# Altium integrated library ATK-MD0350_V3.0.IntLib: 21 symbols
Pins are listed as number, name and electrical type; pins without a type are passive.

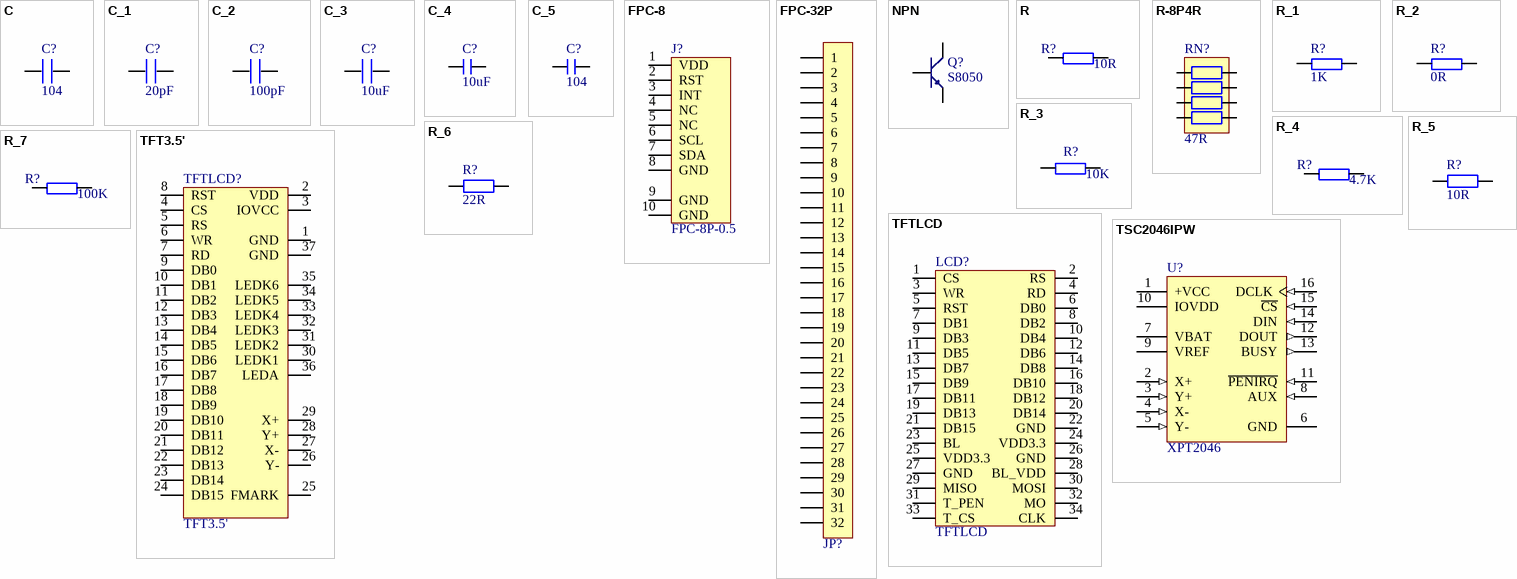
[diagram p0: symbols C to TSC2046IPW]

## C
designator C?, comment 104
footprint 0603P
footprint 0805
footprint C 0402 (无极性贴片电容(0402))
pins: 1, 2

## C_1
designator C?, comment 20pF
footprint 0603P
footprint 0805
footprint CC5.08 (CAP0.1)
footprint CC4.572 (222/332)
footprint 1206
footprint 1210
footprint CC6.096
footprint CC7.62
footprint C 0805 (无极性贴片电容(0805))
footprint C 0603 (无极性贴片电容(0603))
footprint C 0402 (无极性贴片电容(0402))
pins: 1, 2

## C_2
designator C?, comment 100pF
footprint 0603P
footprint 0805
footprint CC5.08 (CAP0.1)
footprint CC4.572 (222/332)
footprint 1206
footprint 1210
footprint CC6.096
footprint CC7.62
footprint C 0805 (无极性贴片电容(0805))
footprint C 0603 (无极性贴片电容(0603))
footprint C 0402 (无极性贴片电容(0402))
pins: 1, 2

## C_3
designator C?, comment 10uF
footprint 0603P
footprint 0805
footprint CC5.08 (CAP0.1)
footprint CC4.572 (222/332)
footprint 1206
footprint 1210
footprint CC6.096
footprint CC7.62
footprint C 0603 (无极性贴片电容(0603))
pins: 1, 2

## C_4
designator C?, comment 10uF
无极性电容; BOM名称: 无极性贴片电容; 版权归属: 正点原子; 学习资源: www.openedv.com
footprint C 0201 (无极性贴片电容)
footprint C 0402 (无极性贴片电容)
footprint C 0603 (无极性贴片电容)
footprint C 0805 (无极性贴片电容)
footprint C 1206 (无极性贴片电容)
footprint C 1210 (无极性贴片电容)
footprint C 1808 (无极性贴片电容)
footprint C 1812 (无极性贴片电容)
footprint C 1825 (无极性贴片电容)
footprint C 2225 (无极性贴片电容)
pins: 1, 2

## C_5
designator C?, comment 104
无极性电容; BOM名称: 无极性贴片电容; 版权归属: 正点原子; 学习资源: www.openedv.com
footprint C 0201 (无极性贴片电容)
footprint C 0402 (无极性贴片电容)
footprint C 0603 (无极性贴片电容)
footprint C 0805 (无极性贴片电容)
footprint C 1206 (无极性贴片电容)
footprint C 1210 (无极性贴片电容)
footprint C 1808 (无极性贴片电容)
footprint C 1812 (无极性贴片电容)
footprint C 1825 (无极性贴片电容)
footprint C 2225 (无极性贴片电容)
pins: 1, 2

## FPC-8
designator J?, comment FPC-8P-0.5
FPC-8P-0.5mm
footprint FPC50
footprint FPC-8P (FPC;8P;0.5mm;)
pins: 1 VDD, 2 RST, 3 INT, 4 NC, 5 NC, 6 SCL, 7 SDA, 8 GND, 9 GND, 10 GND
2 alternate drawings of the same symbol

## FPC-32P
designator JP?, comment FPC1.0-32P  (value not drawn)
FPC连接器; 版权归属: 源创客; BOM名称: FPC连接器; 学习资源: www.ooocke.com
footprint FPC1.25A-LI-32P (32脚，长：43.5mm，宽：4.5mm，高：7.3mm)
footprint FPC0.5 2H-WS-32P (长：20.2mm，宽：5.2mm，高：2mm)
footprint FPC 0.5 32P H-S (FPC座 0.5mm 32P 卧式贴片)
pins: 1, 2, 3, 4, 5, 6, 7, 8, 9, 10, 11, 12, 13, 14, 15, 16, 17, 18, 19, 20, 21, 22, 23, 24, 25, 26, 27, 28, 29, 30, 31, 32

## NPN
designator Q?, comment S8050
8050/BCW846/BCW847
footprint SOT-23R (SOT-23; 3 Leads; Body 3.0 x 2.5 mm, inc. leads (LxW max))
footprint NPN
pins: 1 E, 2 B, 3 C

## R
designator R?, comment 10R
footprint 0805
footprint 0603P
footprint RL (10o/0.7uH)
footprint R16.0 (RX/1W)
footprint 1206
footprint 1210
footprint R20.0 (RX/2W)
footprint R10.16 (STD)
footprint RLN9 (13.5mm*5.1mm)
footprint R 0402 (1/16W贴片电阻)
pins: 1, 2

## R-8P4R
designator RN?, comment 47R
排阻; BOM名称: 贴片网络排阻; 版权归属: 正点原子; Parameter: 电阻; 学习资源: www.openedv.com
footprint RCA-8P4R-0402 (2mm*1mm*0.45mm(长*宽*厚))
footprint RCA-8P4R-0603 (3.2mm*1.6mm*0.6mm(长*宽*厚))
pins: 1, 2, 3, 4, 5, 6, 7, 8

## R_1
designator R?, comment 1K
footprint 0805
footprint 0603P
footprint R 0402 (1/16W贴片电阻)
pins: 1, 2

## R_2
designator R?, comment 0R
footprint 0805
footprint 0603P
footprint RL (10o/0.7uH)
footprint R16.0 (RX/1W)
footprint 1206
footprint 1210
footprint R20.0 (RX/2W)
footprint R10.16 (STD)
footprint RLN9 (13.5mm*5.1mm)
footprint R 0402 (1/16W贴片电阻)
pins: 1, 2

## R_3
designator R?, comment 10K
footprint 0805
footprint 0603P
footprint R 0402 (1/16W贴片电阻)
pins: 1, 2

## R_4
designator R?, comment 4.7K
footprint 0805
footprint 0603P
footprint RL (10o/0.7uH)
footprint R16.0 (RX/1W)
footprint 1206
footprint 1210
footprint R20.0 (RX/2W)
footprint R10.16 (STD)
footprint RLN9 (13.5mm*5.1mm)
footprint R 0402 (1/16W贴片电阻)
pins: 1, 2

## R_5
designator R?, comment 10R
电阻; BOM名称: 贴片电阻; 版权归属: 正点原子; 学习资源: www.openedv.com; Parameter: 电阻
footprint R 0201 (1/20W贴片电阻)
footprint R 0402 (1/16W贴片电阻)
footprint R 0603 (1/10W贴片电阻)
footprint R 0805 (1/8W贴片电阻)
footprint R 1206 (1/4W贴片电阻)
footprint R 1210 (1/3W贴片电阻)
footprint R 1812 (1/2W贴片电阻)
footprint R 2010 (3/4W贴片电阻)
footprint R 2512 (1W贴片电阻)
pins: 1, 2

## R_6
designator R?, comment 22R
电阻; BOM名称: 贴片电阻; 版权归属: 正点原子; 学习资源: www.openedv.com; Parameter: 电阻
footprint R 0201 (1/20W贴片电阻)
footprint R 0402 (1/16W贴片电阻)
footprint R 0603 (1/10W贴片电阻)
footprint R 0805 (1/8W贴片电阻)
footprint R 1206 (1/4W贴片电阻)
footprint R 1210 (1/3W贴片电阻)
footprint R 1812 (1/2W贴片电阻)
footprint R 2010 (3/4W贴片电阻)
footprint R 2512 (1W贴片电阻)
pins: 1, 2

## R_7
designator R?, comment 100K
footprint 0805
footprint 0603P
footprint RL (10o/0.7uH)
footprint R16.0 (RX/1W)
footprint 1206
footprint 1210
footprint R20.0 (RX/2W)
footprint R10.16 (STD)
footprint RLN9 (13.5mm*5.1mm)
footprint R 0402 (1/16W贴片电阻)
pins: 1, 2

## TFT3.5'
designator TFTLCD?
3.5寸,带触摸,分辨率:480*320
footprint TFT3.5'_C (电容屏版本)
pins: 1 GND, 2 VDD, 3 IOVCC, 4 CS, 5 RS, 6 WR, 7 RD, 8 RST, 9 DB0, 10 DB1, 11 DB2, 12 DB3, 13 DB4, 14 DB5, 15 DB6, 16 DB7, 17 DB8, 18 DB9, 19 DB10, 20 DB11, 21 DB12, 22 DB13, 23 DB14, 24 DB15, 25 FMARK, 26 Y-, 27 X-, 28 Y+, 29 X+, 30 LEDK1, 31 LEDK2, 32 LEDK3, 33 LEDK4, 34 LEDK5, 35 LEDK6, 36 LEDA, 37 GND

## TFTLCD
designator LCD?
正点原子MCU屏通用接口
footprint TFTLCD-2.8 (MCULCD-2.4'/2.8')
footprint TFTLCD-3.5 (MCULCD-3.5')
footprint TFTLCD-4.3 (MCULCD-4.3')
footprint DB2*17-3.5_C
pins: 1 CS, 2 RS, 3 WR, 4 RD, 5 RST, 6 DB0, 7 DB1, 8 DB2, 9 DB3, 10 DB4, 11 DB5, 12 DB6, 13 DB7, 14 DB8, 15 DB9, 16 DB10, 17 DB11, 18 DB12, 19 DB13, 20 DB14, 21 DB15, 22 GND, 23 BL, 24 VDD3.3, 25 VDD3.3, 26 GND, 27 GND, 28 BL_VDD, 29 MISO, 30 MOSI, 31 T_PEN, 32 MO, 33 T_CS, 34 CLK

## TSC2046IPW
designator U?, comment XPT2046
显示屏触摸驱动芯片; BOM名称: 触摸驱动芯片; 版权归属: 正点原子; Parameter: 芯片; 学习资源: www.openedv.com
footprint TSSOP16_N (5*6.4*1mm（长宽高）)
footprint TSSOP16_L (5*6.4*1mm（长宽高）)
footprint TSSOP16_M (5*6.4*1mm（长宽高）)
pins: 1 +VCC (power), 2 X+ (in), 3 Y+ (in), 4 X- (in), 5 Y- (in), 6 GND (power), 7 VBAT (power), 8 AUX (in), 9 VREF (power), 10 IOVDD (power), 11 ~{PENIRQ} (in), 12 DOUT (out), 13 BUSY (out), 14 DIN (in), 15 ~{CS} (in), 16 DCLK (in)